# Altium footprint library Regulator$.PcbLib: 106 footprints (part 2 of 7)
Each footprint in its own frame and in the unit in brackets; x right, y up, seen from the top. Pads: shape width x height; smd on the part's side, far side on the other; paste and mask are expansions set on the pad; w line width, h text height; cw(c..) or ccw(c..) is an arc to the next point about the centre after c.
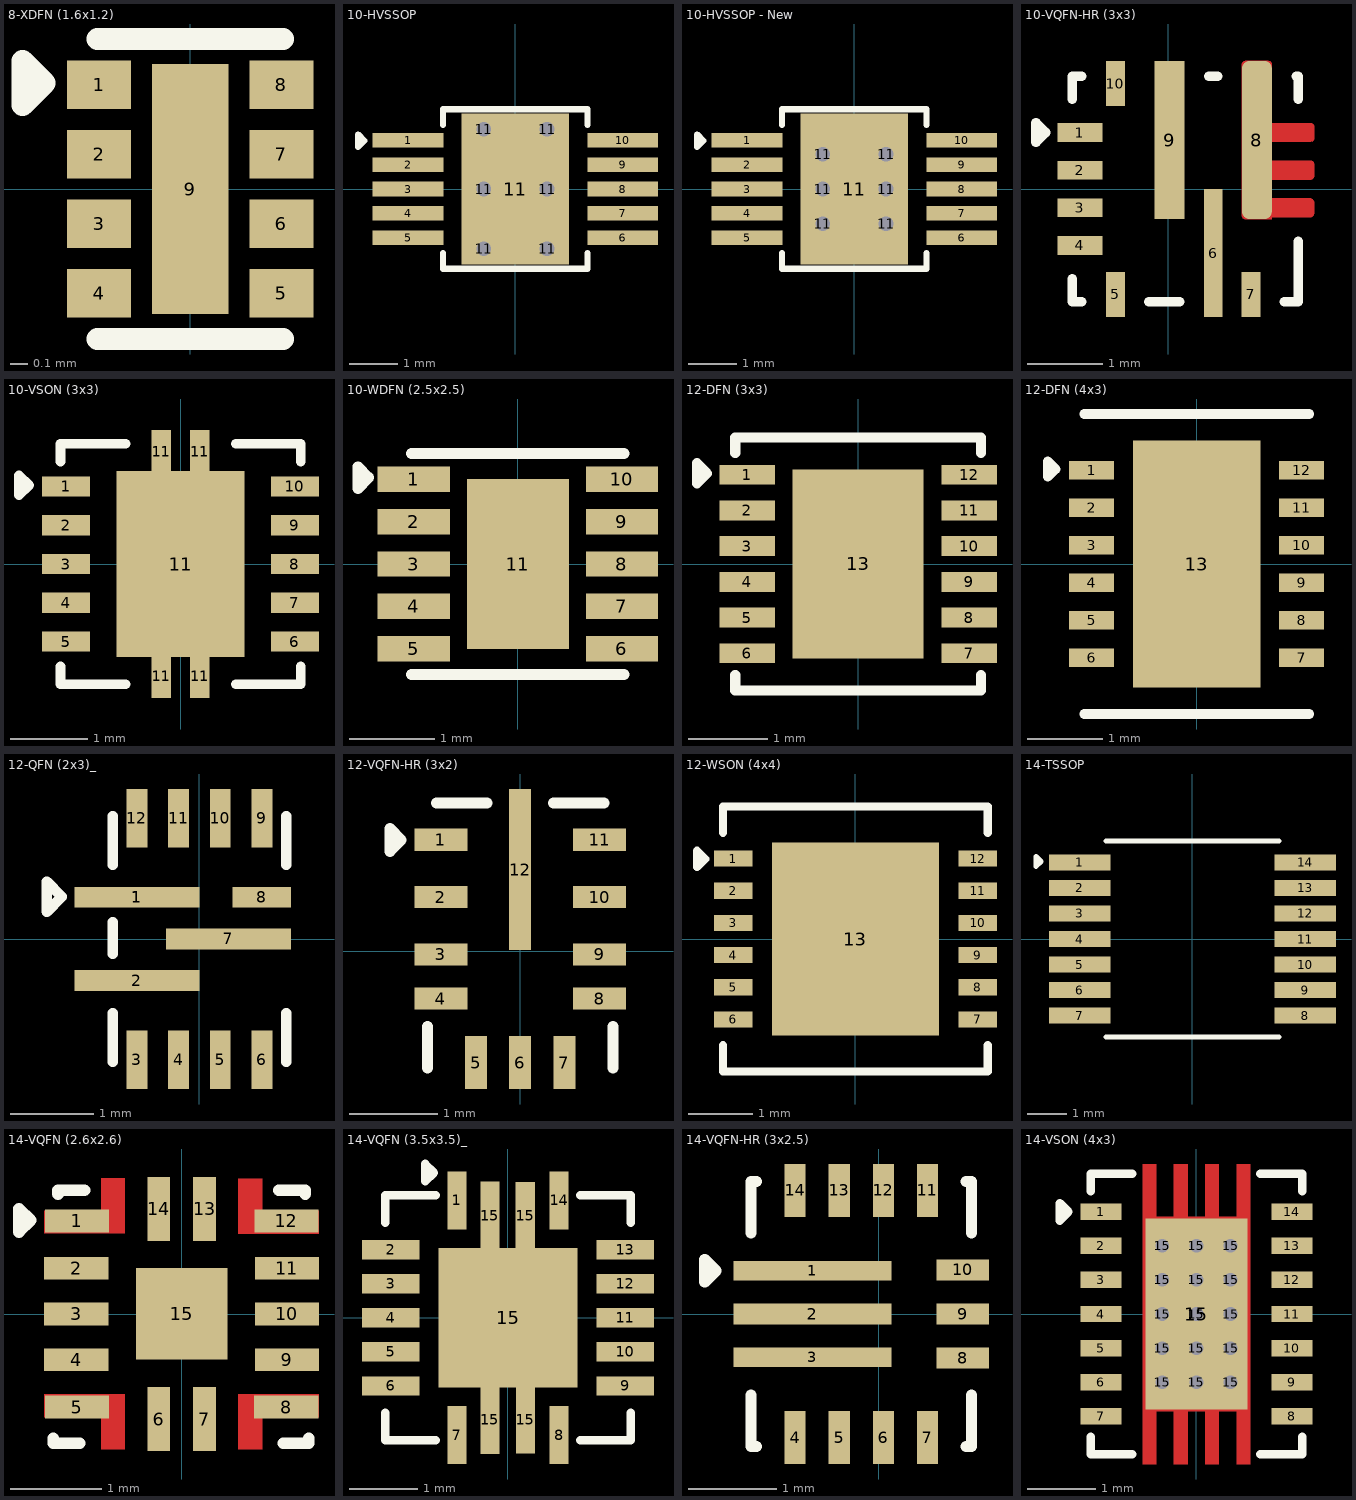
[diagram p1: the footprints below, top view; thin cyan lines are the x and y axes]

## 8-XDFN (1.6x1.2) [mm]
pads (9):
  rect 0.37x0.28 smd: 1(-0.525,0.6) 2(-0.525,0.2) 3(-0.525,-0.2) 4(-0.525,-0.6) 5(0.525,-0.6) 6(0.525,-0.2) 7(0.525,0.2) 8(0.525,0.6)
  rect 0.44x1.44 smd: 9(0,0)
Top Overlay:
  lines w0.127: -0.533,-0.864 0.533,-0.864 ; -0.533,0.864 0.533,0.864 ; -0.965,0.483 -0.838,0.61 -0.965,0.737 -0.965,0.483
3D body ".stp": height 0.39, standoff -0.01, extent -0.6,-0.8 0.6,0.8

## 10-HVSSOP [mm] "IC BATT CHG LI-ION 1CELL 10MSOP"
pads (17):
  rect 1.45x0.3 smd: 1(-2.2,1) 2(-2.2,0.5) 3(-2.2,0) 4(-2.2,-0.5) 5(-2.2,-1) 6(2.2,-1) 7(2.2,-0.5) 8(2.2,0) 9(2.2,0.5) 10(2.2,1)
  round 0.45 hole 0.3: 11(-0.65,-1.224) 11(-0.65,0) 11(-0.65,1.224) 11(0.65,-1.224) 11(0.65,0) 11(0.65,1.224)
  rect 2.2x3.1 smd: 11(0,0)
Top Overlay:
  lines w0.127: -1.481,-1.313 -1.481,-1.636 1.473,-1.636 ; -1.481,1.313 -1.481,1.636 1.473,1.636 ; 1.481,-1.636 1.481,-1.313 ; 1.481,1.313 1.481,1.636 ; -3.226,0.864 -3.099,0.991 -3.226,1.118 -3.226,0.864
3D body "BQ24092DGQR.STEP": height 1.1, standoff 0, extent -2.45,-1.5 2.45,1.5

## 10-HVSSOP - New [mm] "IC BATT CHG LI-ION 1CELL 10MSOP"
pads (17):
  rect 1.45x0.3 smd: 1(-2.2,1) 2(-2.2,0.5) 3(-2.2,0) 4(-2.2,-0.5) 5(-2.2,-1) 6(2.2,-1) 7(2.2,-0.5) 8(2.2,0) 9(2.2,0.5) 10(2.2,1)
  round 0.45 hole 0.3: 11(-0.65,-0.716) 11(-0.65,0) 11(-0.65,0.716) 11(0.65,-0.716) 11(0.65,0) 11(0.65,0.716)
  rect 2.2x3.1 smd: 11(0,0)
Top Overlay:
  lines w0.127: -1.481,-1.313 -1.481,-1.636 1.473,-1.636 ; -1.481,1.313 -1.481,1.636 1.473,1.636 ; 1.481,-1.636 1.481,-1.313 ; 1.481,1.313 1.481,1.636 ; -3.226,0.864 -3.099,0.991 -3.226,1.118 -3.226,0.864
3D body "BQ24092DGQR.STEP": height 1.1, standoff 0, extent -2.45,-1.5 2.45,1.5

## 10-VQFN-HR (3x3) [mm]
pads (10):
  rect 0.6x0.25 smd paste+0 mask+0.07: 1(-1.175,0.75) 2(-1.175,0.25) 3(-1.175,-0.25) 4(-1.175,-0.75)
  rect 0.25x0.6 smd paste+0 mask+0.07: 5(-0.705,-1.4) 7(1.095,-1.4) 10(-0.705,1.4)
  rect 0.25x1.7 smd paste+0 mask+0.07: 6(0.595,-0.85)
  rrect50% 0.4x2.1 smd mask+0.07: 8(1.175,0.65)
  rect 0.4x2.1 smd paste+0 mask+0.07: 9(0.015,0.65)
Top Layer:
  region: 286 vertices and 0 holes, not listed, extent 0.975,-0.4 1.936,1.7
Top Overlay:
  lines w0.127: -1.275,-1.195 -1.275,-1.5 -1.15,-1.5 ; -1.275,1.195 -1.275,1.5 -1.15,1.5 ; -0.26,-1.5 0.15,-1.5 ; 0.535,1.5 0.655,1.5 ; 1.54,-1.5 1.725,-1.5 1.725,-0.695 ; 1.695,1.5 1.725,1.5 1.725,1.195 ; -1.759,0.623 -1.632,0.75 -1.759,0.877 -1.759,0.623
3D body "TPS56637RPAR--3DModel-STEP-56544.STEP": height 1, standoff 0, extent -1.271,-1.5 1.729,1.5

## 10-VSON (3x3) [mm]
pads (15):
  rect 0.62x0.26 smd: 1(-1.475,1) 2(-1.475,0.5) 3(-1.475,0) 4(-1.475,-0.5) 5(-1.475,-1) 6(1.475,-1) 7(1.475,-0.5) 8(1.475,0) 9(1.475,0.5) 10(1.475,1)
  rect 0.25x0.55 smd: 11(-0.25,-1.45) 11(-0.25,1.45) 11(0.25,-1.45) 11(0.25,1.45)
  rect 1.65x2.4 smd: 11(0,0)
Top Overlay:
  lines w0.127: -1.549,-1.321 -1.549,-1.549 -0.711,-1.549 ; -1.549,1.321 -1.549,1.549 -0.711,1.549 ; 0.711,-1.549 1.549,-1.549 1.549,-1.321 ; 0.711,1.549 1.549,1.549 1.549,1.321 ; -2.083,0.889 -1.956,1.016 -2.083,1.143 -2.083,0.889
3D body "TPS63000DRCR.STEP": height 1, standoff 0, extent -1.5,-1.5 1.5,1.5

## 10-WDFN (2.5x2.5) [mm]
pads (11):
  rect 0.85x0.3 smd mask+0.05: 1(-1.225,1) 2(-1.225,0.5) 3(-1.225,0) 4(-1.225,-0.5) 5(-1.225,-1) 6(1.225,-1) 7(1.225,-0.5) 8(1.225,0) 9(1.225,0.5) 10(1.225,1)
  rect 1.2x2 smd paste-2 mask+0.05: 11(0,0)
Top Overlay:
  lines w0.127: -1.25,-1.301 1.25,-1.301 ; -1.25,1.301 1.25,1.301 ; -1.88,0.889 -1.88,1.143 -1.753,1.016 -1.88,0.889
3D body "step_temp.STEP": height 0.8, standoff 0, extent -1.25,-1.25 1.25,1.25

## 12-DFN (3x3) [mm]
pads (13):
  rect 0.7x0.25 smd: 1(-1.4,1.125) 2(-1.4,0.675) 3(-1.4,0.225) 4(-1.4,-0.225) 5(-1.4,-0.675) 6(-1.4,-1.125) 7(1.4,-1.125) 8(1.4,-0.675) 9(1.4,-0.225) 10(1.4,0.225) 11(1.4,0.675) 12(1.4,1.125)
  rect 1.65x2.38 smd: 13(0,0)
Top Overlay:
  lines w0.127: -1.549,-1.397 -1.549,-1.596 1.549,-1.596 1.549,-1.397 ; -1.549,1.397 -1.549,1.596 1.549,1.596 1.549,1.397 ; -2.032,1.016 -2.032,1.27 -1.905,1.143 -2.032,1.016
3D body "DFN-12_DD_LIT.step": height 0.8, standoff 0, extent -1.55,-1.55 1.55,1.55

## 12-DFN (4x3) [mm]
pads (13):
  rect 0.6x0.25 smd paste+0 mask+0.051: 1(-1.4,1.25) 2(-1.4,0.75) 3(-1.4,0.25) 4(-1.4,-0.25) 5(-1.4,-0.75) 6(-1.4,-1.25) 7(1.4,-1.25) 8(1.4,-0.75) 9(1.4,-0.25) 10(1.4,0.25) 11(1.4,0.75) 12(1.4,1.25)
  rect 1.7x3.3 smd paste+0 mask+0.051: 13(0,0)
Top Overlay:
  lines w0.127: -1.5,-2 0,-2 1.5,-2 ; -1.5,2 0,2 1.5,2 ; -1.981,1.164 -1.88,1.266 -1.981,1.368 -1.981,1.164
3D body "ISL85005AFRZ-T7A.stp": height 0.9, standoff 0, extent -1.55,-2 1.55,2

## 12-QFN (2x3)_ [mm]
pads (13):
  rect 1.5x0.25 smd: 1(-0.75,0.5) 1(-0.75,0.5) 2(-0.75,-0.5) 7(0.35,0)
  rect 0.25x0.7 smd: 3(-0.75,-1.45) 4(-0.25,-1.45) 5(0.25,-1.45) 6(0.75,-1.45) 9(0.75,1.45) 10(0.25,1.45) 11(-0.25,1.45) 12(-0.75,1.45)
  rect 0.7x0.25 smd: 8(0.75,0.5)
Top Overlay:
  lines w0.127: -1.041,-1.473 -1.041,-0.889 ; -1.041,-0.178 -1.041,0.203 ; -1.041,0.889 -1.041,1.473 ; 1.041,-1.473 1.041,-0.889 ; 1.041,0.889 1.041,1.473 ; -1.829,0.33 -1.829,0.686 -1.651,0.508 -1.829,0.33
3D body "MP8759GD-Z.stp": height 1.1, standoff 0, extent -1,-1.45 1,1.5

## 12-VQFN-HR (3x2) [mm]
pads (12):
  rect 0.6x0.25 smd mask+0.075: 1(-0.9,1.263) 2(-0.9,0.613) 3(-0.9,-0.037) 4(-0.9,-0.537) 8(0.9,-0.537) 9(0.9,-0.037) 10(0.9,0.613) 11(0.9,1.263)
  rect 0.25x0.6 smd mask+0.075: 5(-0.5,-1.262) 6(0,-1.262) 7(0.5,-1.262)
  rect 0.25x1.825 smd paste+0 mask+0.075: 12(0,0.925)
Top Overlay:
  lines w0.127: -1.051,-1.322 -1.051,-0.854 ; -0.949,1.678 -0.38,1.678 ; 0.38,1.678 0.949,1.678 ; 1.051,-1.322 1.051,-0.854 ; -1.476,1.133 -1.349,1.26 -1.476,1.387 -1.476,1.133
3D body "LMR33620CQ5RNXRQ1.step": height 0.9, standoff 0, extent -1,-1.373 1,1.627

## 12-WSON (4x4) [mm]
pads (13):
  rect 0.6x0.25 smd: 1(-1.9,1.25) 2(-1.9,0.75) 3(-1.9,0.25) 4(-1.9,-0.25) 5(-1.9,-0.75) 6(-1.9,-1.25) 7(1.9,-1.25) 8(1.9,-0.75) 9(1.9,-0.25) 10(1.9,0.25) 11(1.9,0.75) 12(1.9,1.25)
  rect 2.6x3 smd: 13(0,0)
Top Overlay:
  lines w0.127: -2.057,-1.651 -2.057,-2.057 2.057,-2.057 2.057,-1.651 ; -2.057,1.651 -2.057,2.057 2.057,2.057 2.057,1.651 ; -2.464,1.118 -2.337,1.245 -2.464,1.372 -2.464,1.118
3D body "LM5160ADNTR.STEP": height 1, standoff 0, extent -2,-2 2,2

## 14-TSSOP [mm]
pads (14):
  rect 1.57x0.41 smd: 1(-2.87,1.95) 2(-2.87,1.3) 3(-2.87,0.65) 4(-2.87,0) 5(-2.87,-0.65) 6(-2.87,-1.3) 7(-2.87,-1.95) 8(2.87,-1.95) 9(2.87,-1.3) 10(2.87,-0.65) 11(2.87,0) 12(2.87,0.65) 13(2.87,1.3) 14(2.87,1.95)
Top Overlay:
  lines w0.127: -2.2,-2.5 2.2,-2.5 ; -2.2,2.5 2.2,2.5 ; -3.984,1.848 -3.857,1.975 -3.984,2.102 -3.984,1.848
3D body "TXB0104PWR.step": height 1.2, standoff 0, extent -3.2,-2.5 3.2,2.5

## 14-VQFN (2.6x2.6) [mm]
pads (15):
  rect 0.7x0.25 smd mask+0.05: 1(-1.143,1.016) 2(-1.15,0.5) 3(-1.15,0) 4(-1.15,-0.5) 5(-1.143,-1.016) 8(1.143,-1.016) 9(1.15,-0.5) 10(1.15,0) 11(1.15,0.5) 12(1.143,1.016)
  rect 0.25x0.7 smd mask+0.05: 6(-0.25,-1.148) 7(0.25,-1.148) 13(0.25,1.148) 14(-0.25,1.148)
  rect 1x1 smd mask+0.05: 15(0,0.002)
Top Layer:
  region: -0.62,1.48 -0.62,0.88 -1.5,0.88 -1.5,1.13 -0.88,1.13 -0.88,1.48
  region: 0.62,1.475 0.62,0.875 1.5,0.875 1.5,1.125 0.88,1.125 0.88,1.475
  region: 0.62,-1.475 0.62,-0.875 1.5,-0.875 1.5,-1.125 0.88,-1.125 0.88,-1.475
  region: -0.62,-1.475 -0.62,-0.875 -1.5,-0.875 -1.5,-1.125 -0.88,-1.125 -0.88,-1.475
Top Overlay:
  lines w0.127: -1.4,-1.356 -1.4,-1.41 -1.111,-1.41 ; -1.349,1.31 -1.349,1.349 -1.06,1.349 ; 1.061,1.349 1.349,1.349 1.349,1.31 ; 1.111,-1.41 1.39,-1.41 1.39,-1.356 ; -1.775,0.895 -1.648,1.022 -1.775,1.149 -1.775,0.895
3D body "LMQ66430MC3RXBRQ1.STEP": height 1.05, standoff 0, extent -1.3,-1.298 1.3,1.302

## 14-VQFN (3.5x3.5)_ [mm]
pads (19):
  rect 0.28x0.85 smd: 1(-0.75,1.725) 7(-0.75,-1.725) 8(0.75,-1.725) 14(0.75,1.725)
  rect 0.85x0.28 smd: 2(-1.725,1) 3(-1.725,0.5) 4(-1.725,0) 5(-1.725,-0.5) 6(-1.725,-1) 9(1.725,-1) 10(1.725,-0.5) 11(1.725,0) 12(1.725,0.5) 13(1.725,1)
  rect 0.28x1 smd mask+0.055: 15(-0.267,1.5) 15(-0.267,-1.5) 15(0.254,1.499) 15(0.254,-1.499)
  rect 2.05x2.05 smd: 15(0,0)
Top Overlay:
  lines w0.127: -1.803,-1.397 -1.803,-1.803 -1.067,-1.803 ; -1.803,1.397 -1.803,1.803 -1.067,1.803 ; 1.067,-1.803 1.803,-1.803 1.803,-1.397 ; 1.067,1.803 1.803,1.803 1.803,1.397 ; -1.219,2.007 -1.092,2.134 -1.219,2.261 -1.219,2.007
3D body "RHL0014A.stp": height 1, standoff 0, extent -1.75,-1.75 1.75,1.75

## 14-VQFN-HR (3x2.5) [mm]
pads (14):
  rect 1.79x0.22 smd: 1(-0.755,0.49) 3(-0.755,-0.49)
  rect 1.79x0.24 smd: 2(-0.755,0)
  rect 0.24x0.6 smd: 4(-0.95,-1.4) 5(-0.45,-1.4) 6(0.05,-1.4) 7(0.55,-1.4) 11(0.55,1.4) 12(0.05,1.4) 13(-0.45,1.4) 14(-0.95,1.4)
  rect 0.6x0.24 smd: 8(0.95,-0.5) 9(0.95,0) 10(0.95,0.5)
Top Overlay:
  lines w0.127: -1.45,-0.92 -1.45,-1.5 -1.39,-1.5 ; -1.45,0.92 -1.45,1.5 -1.39,1.5 ; 0.99,-1.5 1.05,-1.5 1.05,-0.92 ; 0.99,1.5 1.05,1.5 1.05,0.92 ; -1.974,0.363 -1.847,0.49 -1.974,0.617 -1.974,0.363
3D body "TPS630250RNCR.STEP": height 1, standoff 0, extent -1.453,-1.5 1.047,1.5

## 14-VSON (4x3) [mm]
pads (30):
  rect 0.6x0.24 smd: 1(-1.4,1.5) 2(-1.4,1) 3(-1.4,0.5) 4(-1.4,0) 5(-1.4,-0.5) 6(-1.4,-1) 7(-1.4,-1.5) 8(1.4,-1.5) 9(1.4,-1) 10(1.4,-0.5) 11(1.4,0) 12(1.4,0.5) 13(1.4,1) 14(1.4,1.5)
  round 0.3 hole 0.2: 15(-0.5,-1) 15(-0.5,-0.5) 15(-0.5,0) 15(-0.5,0.5) 15(-0.5,1) 15(0,-1) 15(0,-0.5) 15(0,0) 15(0,0.5) 15(0,1) 15(0.5,-1) 15(0.5,-0.5) 15(0.5,0) 15(0.5,0.5) 15(0.5,1)
  rect 1.5x2.8 smd: 15(0,0)
Top Layer:
  region: 0.79,-2.2 0.59,-2.2 0.59,-1.425 0.33,-1.425 0.33,-2.2 0.13,-2.2 0.13,-1.425 -0.13,-1.425 -0.13,-2.2 -0.33,-2.2 -0.33,-1.425 -0.59,-1.425 -0.59,-2.2 -0.79,-2.2 -0.79,2.2 -0.59,2.2 -0.59,1.425 -0.33,1.425 -0.33,2.2 -0.13,2.2 -0.13,1.425 0.13,1.425 0.13,2.2 0.33,2.2 0.33,1.425 0.59,1.425 0.59,2.2 0.79,2.2
Top Overlay:
  lines w0.127: -1.549,-2.057 -0.94,-2.057 ; -1.549,-2.05 -1.549,-1.8 ; -1.549,1.8 -1.549,2.05 ; -1.549,2.057 -0.94,2.057 ; 0.94,-2.057 1.549,-2.057 ; 0.94,2.057 1.549,2.057 ; 1.549,-2.05 1.549,-1.8 ; 1.549,1.8 1.549,2.05 ; -2.007,1.372 -2.007,1.626 -1.88,1.499 -2.007,1.372
3D body "TPS63020DSJR--3DModel-STEP-1.STEP": height 1, standoff 0, extent -1.5,-2 1.5,2